# Altium footprint library Cole_.PcbLib: 167 footprints (part 8 of 11)
Each footprint in its own frame and in the unit in brackets; x right, y up, seen from the top. Pads: shape width x height; smd on the part's side, far side on the other; paste and mask are expansions set on the pad; w line width, h text height; cw(c..) or ccw(c..) is an arc to the next point about the centre after c.
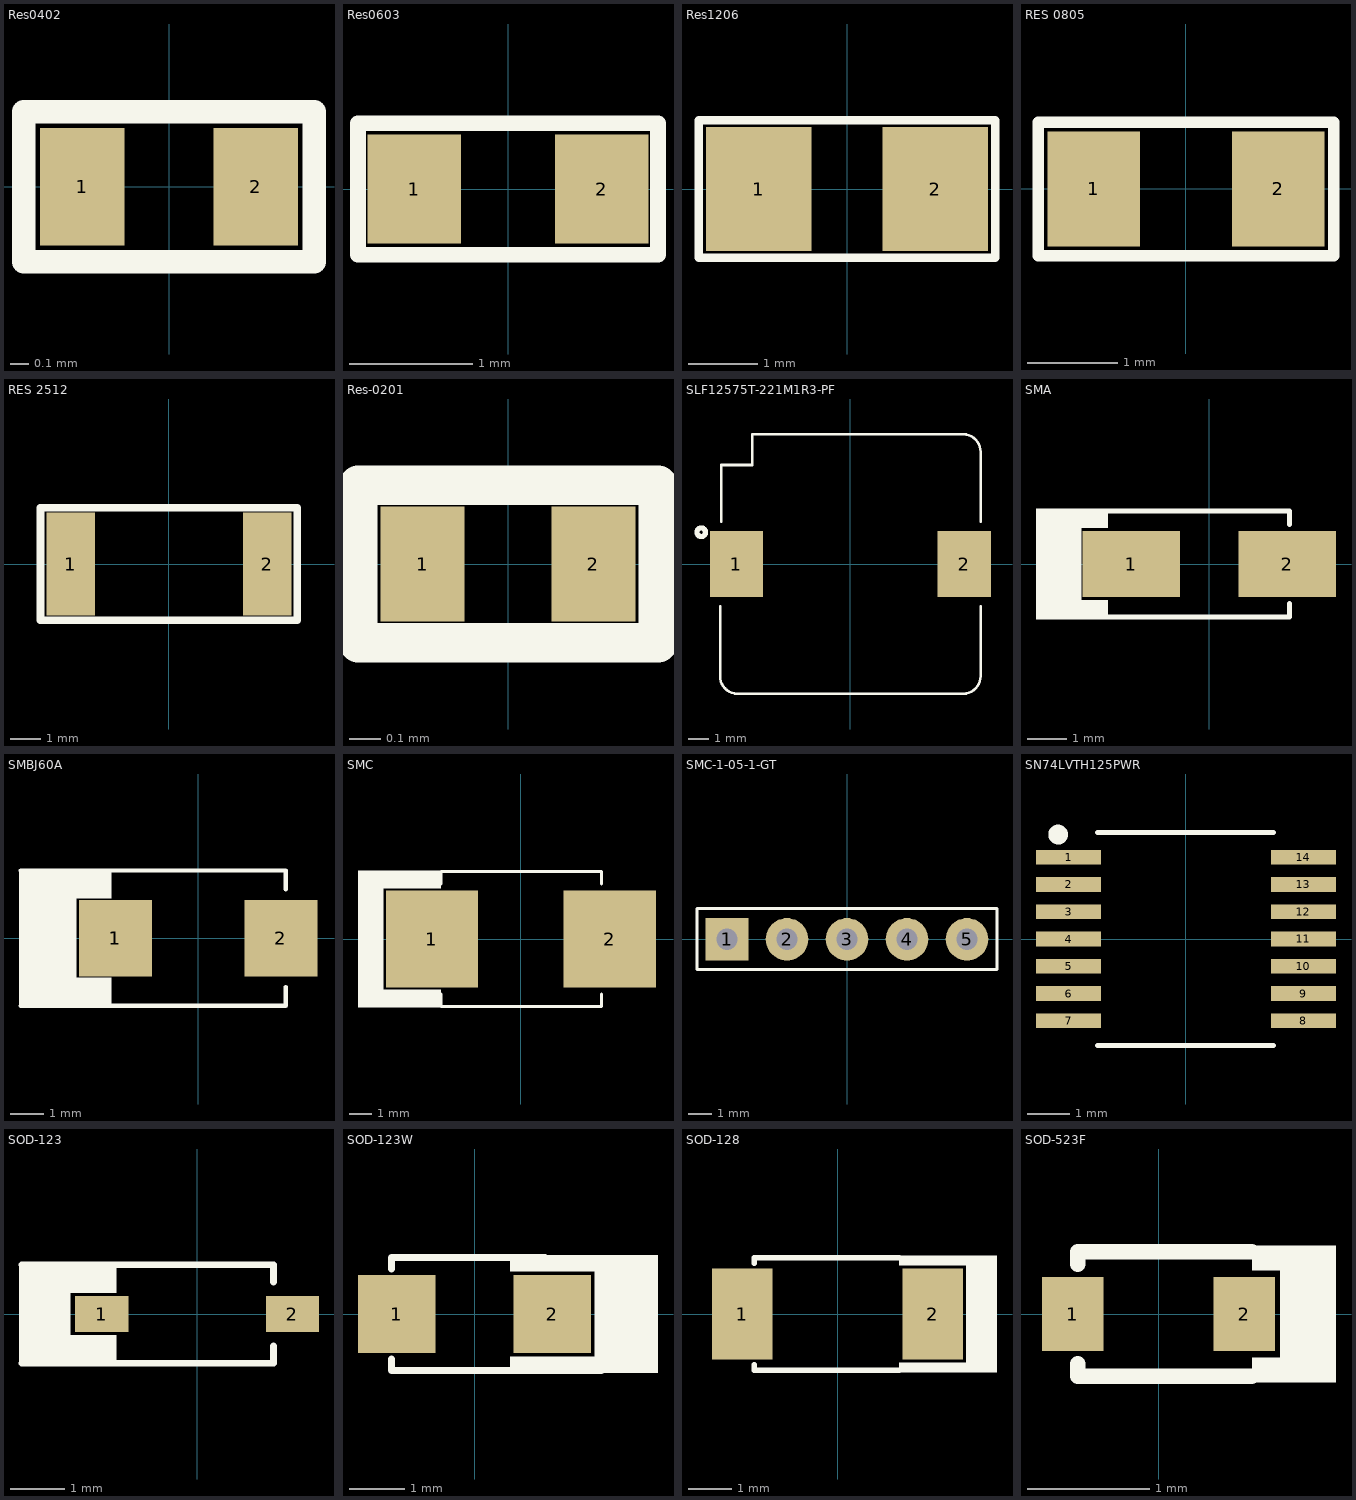
[diagram p7: the footprints below, top view; thin cyan lines are the x and y axes]

## Res0402 [mil]
pads (2):
  rect 18x25 smd mask+4: 1(-18.5,0) 2(18.5,0)
Top Overlay:
  lines w0.13: -32,-17 32,-17
  lines w5: -31,-16 31,-16 31,16 -31,16 -31,-16
3D body "User Library-RES_1005-0402.step": height 16.14, standoff 0, extent -22.63,-10.82 22.64,10.83

## Res0603 [mil]
pads (2):
  rect 30x35 smd: 1(-30,0) 2(30,0)
Top Overlay:
  lines w5: -48,-21 48,-21 48,21 -48,21 -48,-21
3D body "User Library-RESC1608X05N.step": height 17.76, standoff 0, extent -30.52,-16.74 30.51,16.73

## Res1206 [mil]
pads (2):
  rect 60x70 smd: 1(-50,0) 2(50,0)
Top Overlay:
  lines w5: -84,-39 -84,39 84,39 84,-39 -84,-39
3D body "User Library-1206 SMD Resistor.step": height 39.45, standoff 0, extent -62.99,-31.49 63,31.51

## RES 0805 [mil] "SMD 0805"
pads (2):
  rect 40x50 smd: 1(-40,0) 2(40,0)
Top Overlay:
  lines w5: -64,-29 -64,29 64,29 64,-29 -64,-29
3D body "User Library-CR2012-0805.STEP": height 23.62, standoff 0, extent -39.34,-24.75 39.4,24.46

## RES 2512 [mm] "0.033O ±1% 2W ±1800ppm/°C 2512 Low Resistors & Current Sense Resistors - Surface Mount RoHS"
pads (2):
  rect 1.6x3.4 smd: 1(-3.25,0) 2(3.25,0)
Top Overlay:
  lines w0.254: -4.242,-1.854 -4.242,1.854 4.237,1.854 4.237,-1.854 -4.242,-1.854
3D body "CircuitWorks-RESISTOR 2512.step": height 0.58, standoff -0.03, extent -3.175,-1.63 3.175,1.63

## Res-0201 [mm]
pads (2):
  rect 0.27x0.37 smd: 1(-0.275,0) 2(0.275,0)
Top Overlay:
  lines w0.127: -0.483,-0.254 -0.483,0.254 0.483,0.254 0.483,-0.254 -0.483,-0.254
3D body "User Library-0201(0603M) Res.step": height 0.29, standoff -0.02, extent -0.305,-0.152 0.305,0.153

## SLF12575T-221M1R3-PF [mm]
pads (2):
  rect 2.6x3.2 smd: 1(-5.55,0) 2(5.55,0)
Top Overlay:
  circle w0.254: c-7.266,1.549 r0.209
  lines w0.127: -6.35,-2.057 -6.35,-5.461 ccw(c-5.499,-5.474) -5.512,-6.325 5.512,-6.325 ccw(c5.499,-5.474) 6.35,-5.461 6.35,-2.057 ; -6.299,2.057 -6.299,4.826 -4.775,4.826 -4.775,6.325 5.512,6.325 cw(c5.499,5.474) 6.35,5.461 6.35,2.057
3D body "slf12575.step": height 7.5, standoff 0, extent -6.275,-6.326 6.325,6.274

## SMA [mm]
pads (2):
  rect 2.5x1.7 smd: 1(-2,0) 2(2,0)
Top Overlay:
  rectangle: -3.3,0.924 -2.596,1.422
  rectangle: -4.445,-1.422 -3.278,1.422
  rectangle: -3.3,-1.422 -2.596,-0.924
  lines w0.127: -2.658,-1.358 2.061,-1.358 2.061,-1.012 ; -2.658,1.358 2.061,1.358 2.061,1.012
3D body "User Library-DO-214AC SMA.step": height 2.4, standoff 0, extent -2.6,-1.3 2.6,1.3

## SMBJ60A [mm] "TVS DIODE 60V 96.8V DO214AA"
pads (3):
  rect 2.16x2.26 smd: 1(-2.45,0) 1(-2.45,0) 2(2.45,0)
Top Overlay:
  rectangle: -5.309,-2.057 -3.607,2.007
  rectangle: -3.683,1.168 -2.565,2.007
  rectangle: -3.683,-2.007 -2.565,-1.168
  lines w0.127: -5.258,-2.007 2.591,-2.007 2.591,-1.448 ; -5.258,2.007 2.591,2.007 2.591,1.448
3D body "SMBJSeries_LTF.step": height 2.49, standoff 0, extent -2.794,-1.968 2.794,1.968

## SMC [mm]
pads (2):
  rect 4.1x4.3 smd: 1(-3.95,0) 2(3.95,0)
Top Overlay:
  rectangle: -7.239,2.235 -3.556,3.048
  rectangle: -7.239,-3.048 -3.556,-2.235
  rectangle: -7.239,-2.261 -6.096,2.261
  lines w0.127: -3.556,-2.438 -3.556,-2.997 3.581,-2.997 3.581,-2.438 ; -3.556,2.438 -3.556,2.997 3.581,2.997 3.581,2.438
3D body "User Library-DO-214AB-SMC.step": height 2.41, standoff -0.04, extent -3.9,-2.95 3.9,2.95

## SMC-1-05-1-GT [mm]
pads (5):
  rect 1.8x1.8 hole 0.9: 1(-5.08,0)
  round 1.8 hole 0.9: 2(-2.54,0) 3(0,0) 4(2.54,0) 5(5.08,0)
Top Overlay:
  lines w0.127: -6.35,-1.27 -6.35,1.295 6.35,1.295 6.35,-1.27 -6.35,-1.27
3D body "socket_aw127-05z_-hp.stp": height 7, standoff -3, extent -6.325,-1.283 6.375,1.257

## SN74LVTH125PWR [mm]
pads (14):
  rect 1.55x0.35 smd: 1(-2.8,1.95) 2(-2.8,1.3) 3(-2.8,0.65) 4(-2.8,0) 5(-2.8,-0.65) 6(-2.8,-1.3) 7(-2.8,-1.95) 8(2.8,-1.95) 9(2.8,-1.3) 10(2.8,-0.65) 11(2.8,0) 12(2.8,0.65) 13(2.8,1.3) 14(2.8,1.95)
Top Overlay:
  circle w0.254: c-3.048,2.489 r0.108
  lines w0.127: -2.108,-2.54 2.083,-2.54 ; -2.108,2.54 2.083,2.54
3D body "User Library-TSSOP-14.STEP": height 1.2, standoff 0, extent -3.2,-2.5 3.2,2.5

## SOD-123 [mm] "DIODE SCHOTTKY 100V 150MA SOD123"
pads (2):
  rect 0.97x0.65 smd: 1(-1.74,0) 2(1.74,0)
Top Overlay:
  rectangle: -2.362,-0.924 -1.473,-0.381
  rectangle: -2.362,0.381 -1.473,0.924
  rectangle: -3.251,-0.864 -2.311,0.924
  lines w0.127: -3.2,-0.899 1.397,-0.899 1.397,-0.584 ; -3.2,0.899 1.397,0.899 1.397,0.584
3D body "SOD-123_STM.step": height 1.44, standoff -0.01, extent -1.981,-0.851 1.981,0.851

## SOD-123W [mm] "DIODE SCHOTTKY 30V 1A SOD123W"
pads (2):
  rect 1.4x1.4 smd: 1(-1.4,0) 2(1.4,0)
Top Overlay:
  region: 2.286,1.067 0.635,1.067 0.635,0.762 2.286,0.762
  region: 2.286,-0.762 0.635,-0.762 0.635,-1.067 2.286,-1.067
  region: 3.302,1.067 2.159,1.067 2.159,-1.067 3.302,-1.067
  lines w0.127: -1.499,-0.813 -1.499,-1.016 2.286,-1.016 ; -1.499,0.813 -1.499,1.016 -1.143,1.016 1.27,1.016
3D body "User Library-SOD123W.step": height 1.1, standoff -0.01, extent -2,-0.95 2,0.95

## SOD-128 [mm]
pads (2):
  rect 1.4x2.1 smd: 1(-2.2,0) 2(2.2,0)
Top Overlay:
  rectangle: 1.422,1.118 3.683,1.346
  rectangle: 2.972,-1.295 3.683,1.143
  rectangle: 1.422,-1.346 3.683,-1.118
  lines w0.127: -1.93,-1.168 -1.93,-1.295 1.422,-1.295 ; -1.93,1.168 -1.93,1.295 1.422,1.295
3D body "User Library-SOD-128Flat.step": height 1.02, standoff 0, extent -2.4,-1.25 2.4,1.25

## SOD-523F [mm]
pads (2):
  rect 0.5x0.6 smd: 1(-0.7,0) 2(0.7,0)
Top Overlay:
  rectangle: 0.991,-0.406 1.448,0.559
  rectangle: 0.762,-0.559 1.448,-0.356
  rectangle: 0.762,0.356 1.448,0.559
  lines w0.127: -0.66,-0.406 -0.66,-0.508 0.762,-0.508 ; -0.66,0.406 -0.66,0.508 0.762,0.508
3D body "User Library-SOD523F.step": height 0.7, standoff 0, extent -0.85,-0.45 0.85,0.45